# Altium footprint library MISKO.PcbLib: 37 footprints (part 3 of 3)
Each footprint in its own frame and in the unit in brackets; x right, y up, seen from the top. Pads: shape width x height; smd on the part's side, far side on the other; paste and mask are expansions set on the pad; w line width, h text height; cw(c..) or ccw(c..) is an arc to the next point about the centre after c.
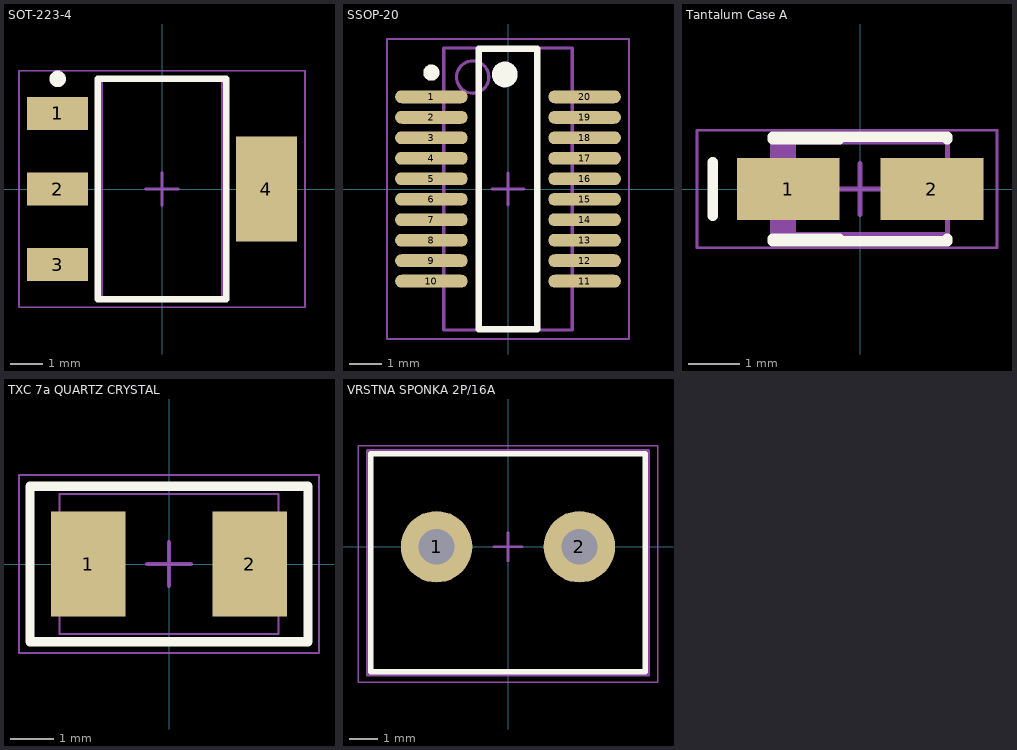
[diagram p2: the footprints below, top view; thin cyan lines are the x and y axes]

## SOT-223-4 [mm]
pads (4):
  rect 1.85x1 smd: 1(-3.175,2.3) 2(-3.175,0) 3(-3.175,-2.3)
  rect 1.85x3.2 smd: 4(3.175,0)
Top Overlay:
  circle w0.25: c-3.175,3.35 r0.125
  lines w0.2: -1.95,-3.35 1.95,-3.35 1.95,3.35 -1.95,3.35 -1.95,-3.35
Top Component Outline:
  lines w0.1: -1.85,-3.35 1.85,-3.35 1.85,3.35 -1.85,3.35 -1.85,-3.35
Top Component courtyard:
  lines w0.05: -4.35,-3.6 4.35,-3.6 4.35,3.6 -4.35,3.6 -4.35,-3.6
  lines w0.1: -0.5,0 0.5,0 ; 0,-0.5 0,0.5
3D body: height 1.8, standoff 0.02, extent -1.85,-3.35 1.85,3.35

## SSOP-20 [mm]
pads (20):
  oval 2.25x0.4 smd: 1(-2.375,2.857) 2(-2.375,2.222) 3(-2.375,1.587) 4(-2.375,0.953) 5(-2.375,0.318) 6(-2.375,-0.318) 7(-2.375,-0.953) 8(-2.375,-1.587) 9(-2.375,-2.222) 10(-2.375,-2.857) 11(2.375,-2.857) 12(2.375,-2.222) 13(2.375,-1.587) 14(2.375,-0.953) 15(2.375,-0.318) 16(2.375,0.318) 17(2.375,0.953) 18(2.375,1.587) 19(2.375,2.222) 20(2.375,2.857)
Top Overlay:
  circle w0.25: c-2.375,3.608 r0.125
  circle w0.4: c-0.1,3.55 r0.2
  lines w0.2: -0.9,-4.35 -0.9,4.35 0.9,4.35 0.9,-4.35 -0.9,-4.35
Top Component Outline:
  circle w0.1: c-1.095,3.47 r0.5
  lines w0.1: -1.995,-4.37 -1.995,4.37 1.995,4.37 1.995,-4.37 -1.995,-4.37
Top Component courtyard:
  lines w0.05: -3.75,-4.65 -3.75,4.65 3.75,4.65 3.75,-4.65 -3.75,-4.65
  lines w0.1: -0.5,0 0.5,0 ; 0,-0.5 0,0.5
3D body: height 1.76, standoff 0.1, extent -1.995,-4.37 1.995,4.37

## Tantalum Case A [mm]
pads (2):
  rect 2x1.2 smd: 1(-1.4,0) 2(1.4,0)
Top Overlay:
  lines w0.2: -2.87,-0.525 -2.87,0.525 ; -1.7,-1.016 1.7,-1.016 1.7,-0.966 ; -1.7,-0.966 -0.4,-0.966 ; -1.7,0.966 -0.4,0.966 ; -1.7,1.016 1.7,1.016 1.7,0.966
Top Component Outline:
  rectangle: -1.7,-0.887 -1.243,0.913
  lines w0.1: -1.7,-0.887 1.7,-0.887 1.7,0.913 -1.7,0.913 -1.7,-0.887
Top Component courtyard:
  lines w0.05: -3.175,-1.143 -3.175,1.143 2.667,1.143 2.667,-1.143 -3.175,-1.143
  lines w0.1: -0.5,0 0.5,0 ; 0,-0.5 0,0.5
3D body "tant_A.step": height 1.8, standoff 0, extent -1.66,-0.86 1.74,0.94

## TXC 7a QUARTZ CRYSTAL [mm] "TXC 7A series crysal oscillator footprint 5X3.2"
pads (2):
  rect 1.7x2.4 smd: 1(-1.85,0) 2(1.85,0)
Top Overlay:
  lines w0.21: -3.175,-1.778 -0.178,-1.778 3.175,-1.778 3.175,1.778 0.178,1.778 -3.175,1.778 -3.175,-1.778
Top Component Outline:
  lines w0.051: -2.5,-1.6 -2.5,1.6 0,1.6 2.5,1.6 2.5,-1.6 0,-1.6 -2.5,-1.6
Top Component courtyard:
  lines w0.05: -3.429,-2.032 0.232,-2.032 3.429,-2.032 3.429,1.8 3.429,2.032 -0.232,2.032 -3.429,2.032 -3.429,-1.8 -3.429,-2.032
  lines w0.1: -0.5,0 0,0 ; 0,-0.5 0,0 ; 0,0.5 0,0 ; 0.5,0 0,0
3D body "Crystal TXC 7A Series.step": height 1.26, standoff 0.01, extent -2.5,-1.6 2.5,1.6

## VRSTNA SPONKA 2P/16A [mm]
pads (2):
  round 2.54 hole 1.27: 1(-2.54,0) 2(2.54,0)
Top Overlay:
  lines w0.2: -4.877,-4.445 4.877,-4.445 4.877,3.302 -4.877,3.302 -4.877,-4.445
Top Component Outline:
  circle w0.102: c-2.54,0 r0.568
  lines w0.102: -5,-4.571 5,-4.571 5,3.429 -5,3.429 -5,-4.571
Top Component courtyard:
  lines w0.05: -5.334,-4.826 -5.334,3.6 5.334,3.6 5.334,-4.826 -5.334,-4.826
  lines w0.1: -0.5,0 0.5,0 ; 0,-0.5 0,0.5
3D body "User Library-TB2.STEP": height 10.01, standoff -3.49, extent -5,-4.571 5,3.429